# EAGLE library part 3BY3PINS (library F-E library custom components)
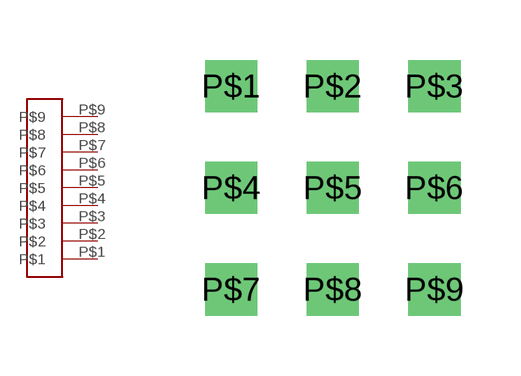
[diagram p1: symbol with the pads of 3BY3PINS; footprint 3BY3PINS]

Designator prefix -

## 3BY3PINS  [3BY3PINS]
P$1  P$1
P$2  P$2
P$3  P$3
P$4  P$4
P$5  P$5
P$6  P$6
P$7  P$7
P$8  P$8
P$9  P$9

## Footprint 3BY3PINS (pad centres in mm)
drill 0.8 square: P$1 1.27,6.35; P$2 3.81,6.35; P$3 6.35,6.35; P$4 1.27,3.81; P$5 3.81,3.81; P$6 6.35,3.81; P$7 1.27,1.27; P$8 3.81,1.27; P$9 6.35,1.27